# Altium footprint library beeper.PcbLib: 1 footprints
Each footprint in its own frame and in the unit in brackets; x right, y up, seen from the top. Pads: shape width x height; smd on the part's side, far side on the other; paste and mask are expansions set on the pad; w line width, h text height; cw(c..) or ccw(c..) is an arc to the next point about the centre after c.
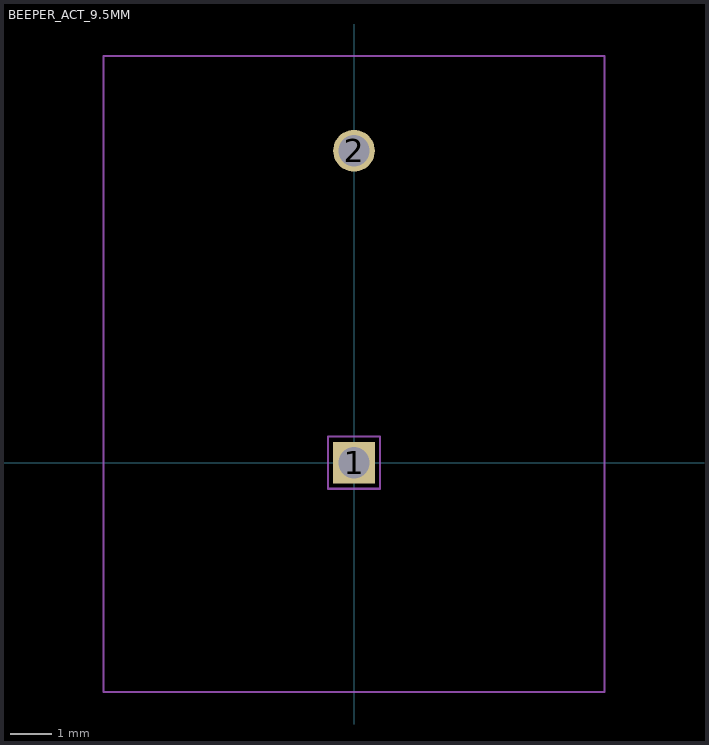
[diagram p0: the footprint, top view; thin cyan lines are the x and y axes]

## BEEPER_ACT_9.5MM [mil]
pads (2):
  rect 40x40 hole 30: 1(0,0)
  round 40 hole 30: 2(0,299)
Mechanical 13:
  lines w2: -25,-25 -25,25 25,25 25,-25 -25,-25
Top Assembly:
  lines w2: -240,-220 240,-220 240,390 -240,390 -240,-220
  text "'.Designator'" at -20,-15 h50
3D body "User Library-WST-1203UX.step": height 379.92, standoff -177.17, extent -236.22,-222.21 236.23,386.22